# Altium footprint library Footprint_Vlad.PcbLib: 392 footprints (part 22 of 25)
Each footprint in its own frame and in the unit in brackets; x right, y up, seen from the top. Pads: shape width x height; smd on the part's side, far side on the other; paste and mask are expansions set on the pad; w line width, h text height; cw(c..) or ccw(c..) is an arc to the next point about the centre after c.
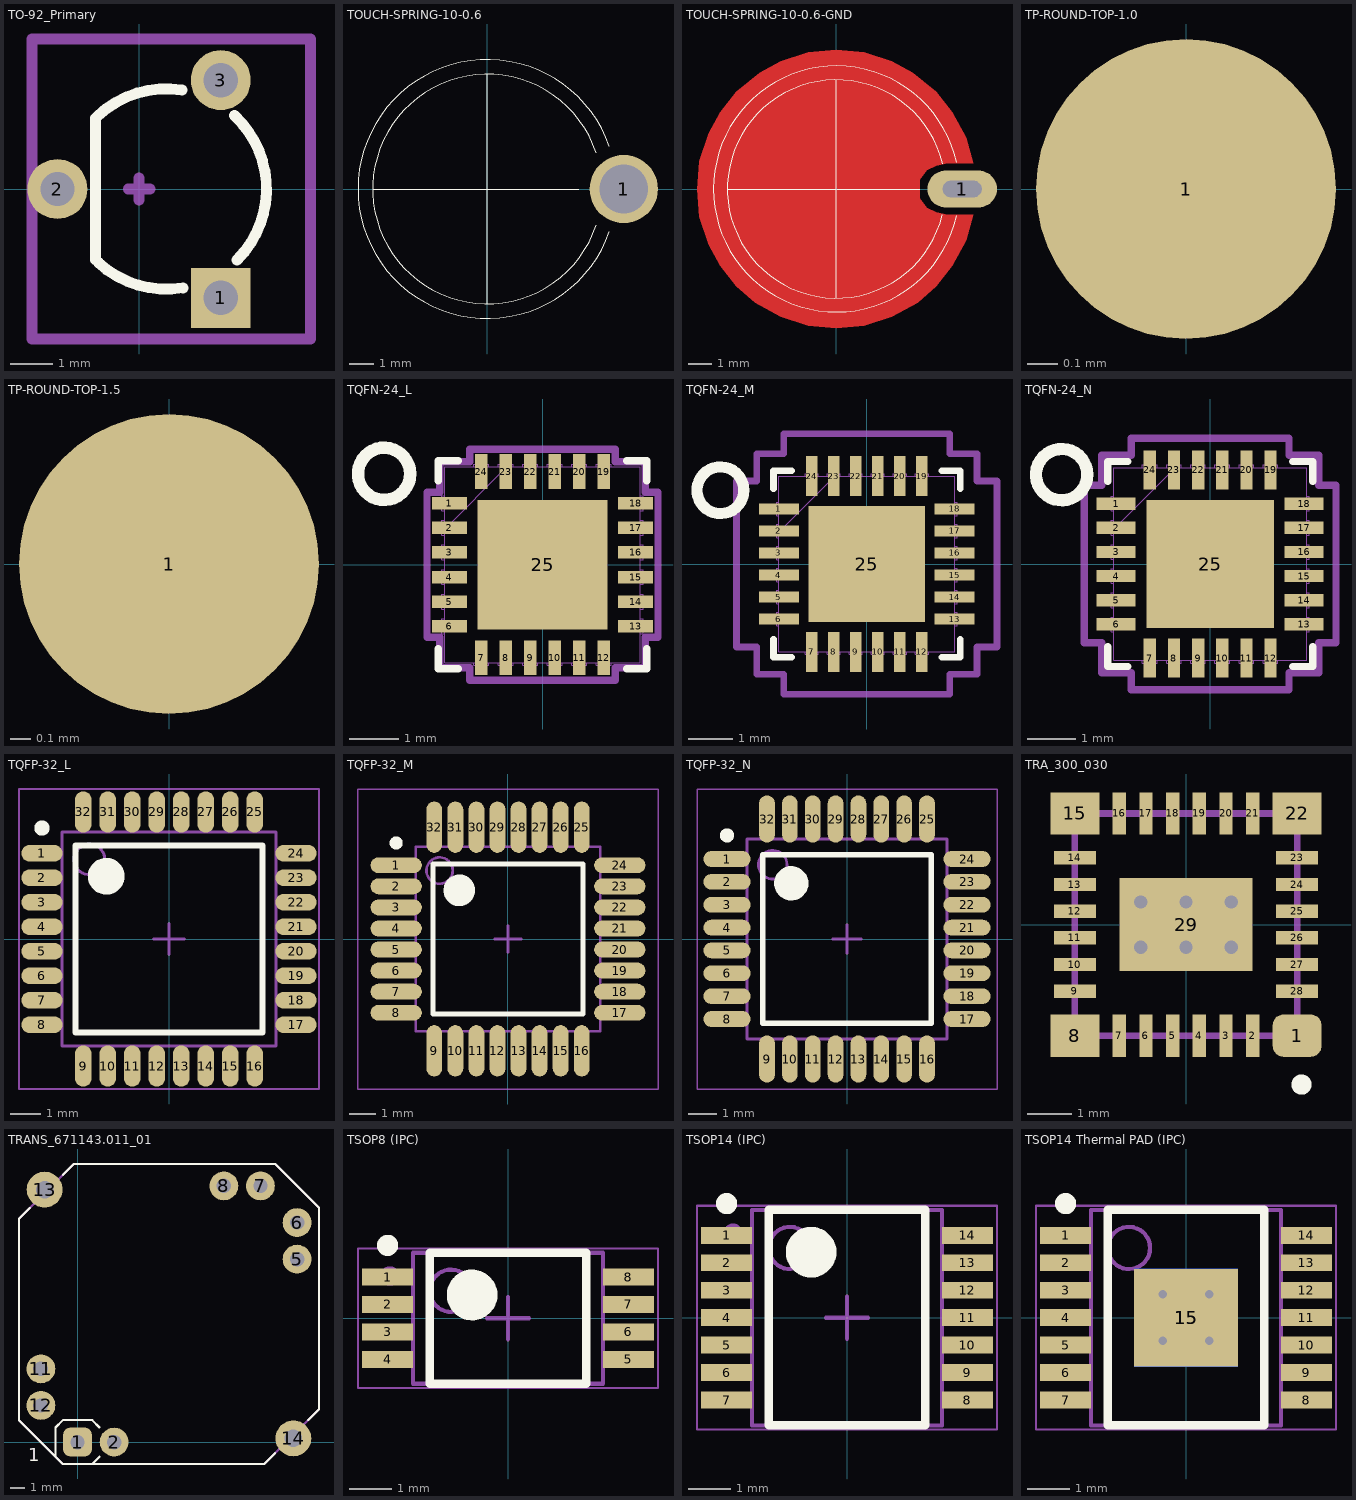
[diagram p21: the footprints below, top view; thin cyan lines are the x and y axes]

## TO-92_Primary [mm]
pads (3):
  rect 1.4x1.4 hole 0.8: 1(1.905,-2.54)
  round 1.4 hole 0.8: 2(-1.905,0) 3(1.905,2.54)
Top Overlay:
  lines w0.254: -1.016,-1.651 -1.016,1.651 ; -0.959,1.71 cw(c0.635,0) 1.001,2.309 ; -0.95,-1.718 ccw(c0.635,0) 1.021,-2.306 ; 2.226,1.712 cw(c0.635,0) 2.288,-1.653
Mechanical 15:
  circle w0.254: c1.9,-2.5 r0.1
  lines w0.254: -0.254,0 0.254,0 ; 0,-0.254 0,0.254 ; -2.5,-3.5 4,-3.5 4,3.5 -2.5,3.5 -2.5,-3.5
  text ".Designator" at -1.3,3.8 h1.52

## TOUCH-SPRING-10-0.6 [mm]
pads (1):
  round 2.8 hole 2: 1(5.6,0)
Top Overlay:
  lines w0.01: 4.588,-0.35 6.238,-0.35 6.238,0.35 4.588,0.35 4.588,-0.35
  lines w0.025: -4.674,0 1.925,0 3.75,0 ; 0,-4.7 0,2.5 0,4.699 ; 4.466,-1.489 cw(c0.008,0.001) 4.466,1.489 ; 5.009,-1.753 cw(c0.008,0.001) 5.01,1.753

## TOUCH-SPRING-10-0.6-GND [mm]
pads (2):
  oval 3x1.6 hole 0.7 slot 1.675 at 0 deg: 1(5.425,0)
  round 0 smd far side paste-25.4 mask-25.4: 2(0,0)
Top Layer:
  region: 0,-6 1.2,-5.9 2.4,-5.5 3.5,-4.9 4.3,-4.2 5,-3.3 5.6,-2.2 5.9,-1.1 4.8,-1.1 4.3,-1 3.9,-0.8 3.6,-0.4 3.6,0 3.6,0.4 3.9,0.8 4.3,1 4.8,1.1 5.9,1.1 5.6,2.2 5,3.3 4.3,4.2 3.3,5 2.4,5.5 1.2,5.9 0,6 -1.2,5.9 -2.4,5.5 -3.3,5 -4.3,4.2 -5,3.3 -5.5,2.4 -5.9,1.2 -6,0 -5.9,-1.2 -5.5,-2.4 -5,-3.3 -4.3,-4.2 -3.5,-4.9 -2.4,-5.5 -1.2,-5.9
Top Overlay:
  lines w0.025: -4.674,0 3.6,0 ; 0,-4.699 0,4.699 ; 4.573,-1.118 cw(c0.008,0.001) 4.579,1.095 ; 5.182,-1.146 cw(c0.008,0.001) 5.183,1.146

## TP-ROUND-TOP-1.0 [mm]
pads (1):
  round 1 smd: 1(0,0)

## TP-ROUND-TOP-1.5 [mm]
pads (1):
  round 1.5 smd: 1(0,0)

## TQFN-24_L [mm]
pads (25):
  rect 0.708x0.255 smd paste+0 mask+0: 1(-1.896,1.25) 2(-1.896,0.75) 3(-1.896,0.25) 4(-1.896,-0.25) 5(-1.896,-0.75) 6(-1.896,-1.25) 13(1.896,-1.25) 14(1.896,-0.75) 15(1.896,-0.25) 16(1.896,0.25) 17(1.896,0.75) 18(1.896,1.25)
  rect 0.255x0.708 smd paste+0 mask+0: 7(-1.25,-1.896) 8(-0.75,-1.896) 9(-0.25,-1.896) 10(0.25,-1.896) 11(0.75,-1.896) 12(1.25,-1.896) 19(1.25,1.896) 20(0.75,1.896) 21(0.25,1.896) 22(-0.25,1.896) 23(-0.75,1.896) 24(-1.25,1.896)
  rect 2.642x2.642 smd paste-1.308 mask+0: 25(0,0)
Top Overlay:
  circle w0.254: c-3.225,1.85 r0.532
  lines w0.152: -2.121,-1.71 -2.121,-2.121 -1.71,-2.121 ; -2.121,1.71 -2.121,2.121 -1.71,2.121 ; 1.71,-2.121 2.121,-2.121 2.121,-1.71 ; 1.71,2.121 2.121,2.121 2.121,1.71
Top Paste:
  region: -0.1,1.221 -1.221,1.221 -1.221,0.1 -0.1,0.1
  region: -0.1,-0.1 -1.221,-0.1 -1.221,-1.221 -0.1,-1.221
  region: 1.221,1.221 0.1,1.221 0.1,0.1 1.221,0.1
  region: 1.221,-0.1 0.1,-0.1 0.1,-1.221 1.221,-1.221
Assembly Top:
  lines w0.025: -1.994,0.724 -0.724,1.994 ; -2.05,-1.402 -2.05,-1.098 -1.994,-1.098 -1.994,-1.402 -2.05,-1.402 ; -2.05,-0.902 -2.05,-0.598 -1.994,-0.598 -1.994,-0.902 -2.05,-0.902 ; -2.05,-0.402 -1.994,-0.402 -1.994,-0.098 -2.05,-0.098 -2.05,-0.402 ; -2.05,0.098 -1.994,0.098 -1.994,0.402 -2.05,0.402 -2.05,0.098 ; -2.05,0.598 -1.994,0.598 -1.994,0.902 -2.05,0.902 -2.05,0.598 ; -2.05,1.098 -1.994,1.098 -1.994,1.402 -2.05,1.402 -2.05,1.098 ; -1.994,-1.994 1.994,-1.994 1.994,1.994 -1.994,1.994 -1.994,-1.994 ; -1.402,-2.05 -1.402,-1.994 -1.098,-1.994 -1.098,-2.05 -1.402,-2.05 ; -1.402,1.994 -1.098,1.994 -1.098,2.05 -1.402,2.05 -1.402,1.994 ; -0.902,-2.05 -0.902,-1.994 -0.598,-1.994 -0.598,-2.05 -0.902,-2.05 ; -0.902,1.994 -0.598,1.994 -0.598,2.05 -0.902,2.05 -0.902,1.994 ; -0.402,-2.05 -0.098,-2.05 -0.098,-1.994 -0.402,-1.994 -0.402,-2.05 ; -0.402,1.994 -0.098,1.994 -0.098,2.05 -0.402,2.05 -0.402,1.994 ; 0.098,-2.05 0.402,-2.05 0.402,-1.994 0.098,-1.994 0.098,-2.05 ; 0.098,1.994 0.402,1.994 0.402,2.05 0.098,2.05 0.098,1.994 ; 0.598,-2.05 0.902,-2.05 0.902,-1.994 0.598,-1.994 0.598,-2.05 ; 0.598,1.994 0.902,1.994 0.902,2.05 0.598,2.05 0.598,1.994 ; 1.098,-2.05 1.402,-2.05 1.402,-1.994 1.098,-1.994 1.098,-2.05 ; 1.098,1.994 1.402,1.994 1.402,2.05 1.098,2.05 1.098,1.994 ; 1.994,-1.402 2.05,-1.402 2.05,-1.098 1.994,-1.098 1.994,-1.402 ; 1.994,-0.902 2.05,-0.902 2.05,-0.598 1.994,-0.598 1.994,-0.902 ; 1.994,-0.402 2.05,-0.402 2.05,-0.098 1.994,-0.098 1.994,-0.402 ; 1.994,0.098 2.05,0.098 2.05,0.402 1.994,0.402 1.994,0.098 ; 1.994,0.598 2.05,0.598 2.05,0.902 1.994,0.902 1.994,0.598 ; 1.994,1.098 2.05,1.098 2.05,1.402 1.994,1.402 1.994,1.098
  text "*" at -1.859,0.865 h1.27
Courtyard Top:
  lines w0.152: -2.352,-1.479 -2.095,-1.479 -2.095,-2.095 -1.479,-2.095 -1.479,-2.352 1.479,-2.352 1.479,-2.095 2.095,-2.095 2.095,-1.479 2.352,-1.479 2.352,1.479 2.095,1.479 2.095,2.095 1.479,2.095 1.479,2.352 -1.479,2.352 -1.479,2.095 -2.095,2.095 -2.095,1.479 -2.352,1.479 -2.352,-1.479
3D body "21-0139_T2444+4_MXM.step": height 0.81, standoff 0, extent -2.05,-2.05 2.05,2.05

## TQFN-24_M [mm]
pads (25):
  rect 0.908x0.255 smd paste+0 mask+0: 1(-1.996,1.25) 2(-1.996,0.75) 3(-1.996,0.25) 4(-1.996,-0.25) 5(-1.996,-0.75) 6(-1.996,-1.25) 13(1.996,-1.25) 14(1.996,-0.75) 15(1.996,-0.25) 16(1.996,0.25) 17(1.996,0.75) 18(1.996,1.25)
  rect 0.255x0.908 smd paste+0 mask+0: 7(-1.25,-1.996) 8(-0.75,-1.996) 9(-0.25,-1.996) 10(0.25,-1.996) 11(0.75,-1.996) 12(1.25,-1.996) 19(1.25,1.996) 20(0.75,1.996) 21(0.25,1.996) 22(-0.25,1.996) 23(-0.75,1.996) 24(-1.25,1.996)
  rect 2.642x2.642 smd paste-1.308 mask+0: 25(0,0)
Top Overlay:
  circle w0.254: c-3.325,1.675 r0.532
  lines w0.152: -2.121,-1.71 -2.121,-2.121 -1.71,-2.121 ; -2.121,1.71 -2.121,2.121 -1.71,2.121 ; 1.71,-2.121 2.121,-2.121 2.121,-1.71 ; 1.71,2.121 2.121,2.121 2.121,1.71
Top Paste:
  region: 1.221,-0.1 0.1,-0.1 0.1,-1.221 1.221,-1.221
  region: 1.221,1.221 0.1,1.221 0.1,0.1 1.221,0.1
  region: -0.1,-0.1 -1.221,-0.1 -1.221,-1.221 -0.1,-1.221
  region: -0.1,1.221 -1.221,1.221 -1.221,0.1 -0.1,0.1
Assembly Top:
  lines w0.025: -1.994,0.724 -0.724,1.994 ; -2.05,-1.402 -1.994,-1.402 -1.994,-1.098 -2.05,-1.098 -2.05,-1.402 ; -2.05,-0.902 -2.05,-0.598 -1.994,-0.598 -1.994,-0.902 -2.05,-0.902 ; -2.05,-0.402 -1.994,-0.402 -1.994,-0.098 -2.05,-0.098 -2.05,-0.402 ; -2.05,0.098 -1.994,0.098 -1.994,0.402 -2.05,0.402 -2.05,0.098 ; -2.05,0.598 -1.994,0.598 -1.994,0.902 -2.05,0.902 -2.05,0.598 ; -2.05,1.098 -1.994,1.098 -1.994,1.402 -2.05,1.402 -2.05,1.098 ; -1.994,-1.994 1.994,-1.994 1.994,1.994 -1.994,1.994 -1.994,-1.994 ; -1.402,-2.05 -1.402,-1.994 -1.098,-1.994 -1.098,-2.05 -1.402,-2.05 ; -1.402,1.994 -1.098,1.994 -1.098,2.05 -1.402,2.05 -1.402,1.994 ; -0.902,-2.05 -0.902,-1.994 -0.598,-1.994 -0.598,-2.05 -0.902,-2.05 ; -0.902,1.994 -0.598,1.994 -0.598,2.05 -0.902,2.05 -0.902,1.994 ; -0.402,-2.05 -0.098,-2.05 -0.098,-1.994 -0.402,-1.994 -0.402,-2.05 ; -0.402,1.994 -0.098,1.994 -0.098,2.05 -0.402,2.05 -0.402,1.994 ; 0.098,-2.05 0.402,-2.05 0.402,-1.994 0.098,-1.994 0.098,-2.05 ; 0.098,1.994 0.402,1.994 0.402,2.05 0.098,2.05 0.098,1.994 ; 0.598,-2.05 0.902,-2.05 0.902,-1.994 0.598,-1.994 0.598,-2.05 ; 0.598,1.994 0.902,1.994 0.902,2.05 0.598,2.05 0.598,1.994 ; 1.098,-2.05 1.402,-2.05 1.402,-1.994 1.098,-1.994 1.098,-2.05 ; 1.098,1.994 1.402,1.994 1.402,2.05 1.098,2.05 1.098,1.994 ; 1.994,-1.402 2.05,-1.402 2.05,-1.098 1.994,-1.098 1.994,-1.402 ; 1.994,-0.902 2.05,-0.902 2.05,-0.598 1.994,-0.598 1.994,-0.902 ; 1.994,-0.402 2.05,-0.402 2.05,-0.098 1.994,-0.098 1.994,-0.402 ; 1.994,0.098 2.05,0.098 2.05,0.402 1.994,0.402 1.994,0.098 ; 1.994,0.598 2.05,0.598 2.05,0.902 1.994,0.902 1.994,0.598 ; 1.994,1.098 2.05,1.098 2.05,1.402 1.994,1.402 1.994,1.098
  text "*" at -1.859,0.865 h1.27
Courtyard Top:
  lines w0.152: -2.958,-1.885 -2.502,-1.885 -2.502,-2.502 -1.885,-2.502 -1.885,-2.958 1.885,-2.958 1.885,-2.502 2.502,-2.502 2.502,-1.885 2.958,-1.885 2.958,1.885 2.502,1.885 2.502,2.502 1.885,2.502 1.885,2.958 -1.885,2.958 -1.885,2.502 -2.502,2.502 -2.502,1.885 -2.958,1.885 -2.958,-1.885
3D body "21-0139_T2444+4_MXM.step": height 0.81, standoff 0, extent -2.05,-2.05 2.05,2.05

## TQFN-24_N [mm]
pads (25):
  rect 0.808x0.255 smd paste+0 mask+0: 1(-1.946,1.25) 2(-1.946,0.75) 3(-1.946,0.25) 4(-1.946,-0.25) 5(-1.946,-0.75) 6(-1.946,-1.25) 13(1.946,-1.25) 14(1.946,-0.75) 15(1.946,-0.25) 16(1.946,0.25) 17(1.946,0.75) 18(1.946,1.25)
  rect 0.255x0.808 smd paste+0 mask+0: 7(-1.25,-1.946) 8(-0.75,-1.946) 9(-0.25,-1.946) 10(0.25,-1.946) 11(0.75,-1.946) 12(1.25,-1.946) 19(1.25,1.946) 20(0.75,1.946) 21(0.25,1.946) 22(-0.25,1.946) 23(-0.75,1.946) 24(-1.25,1.946)
  rect 2.642x2.642 smd paste-1.308 mask+0: 25(0,0)
Top Overlay:
  circle w0.254: c-3.075,1.85 r0.532
  lines w0.152: -2.121,-1.71 -2.121,-2.121 -1.71,-2.121 ; -2.121,1.71 -2.121,2.121 -1.71,2.121 ; 1.71,-2.121 2.121,-2.121 2.121,-1.71 ; 1.71,2.121 2.121,2.121 2.121,1.71
Top Paste:
  region: 1.221,-0.1 0.1,-0.1 0.1,-1.221 1.221,-1.221
  region: 1.221,1.221 0.1,1.221 0.1,0.1 1.221,0.1
  region: -0.1,-0.1 -1.221,-0.1 -1.221,-1.221 -0.1,-1.221
  region: -0.1,1.221 -1.221,1.221 -1.221,0.1 -0.1,0.1
Assembly Top:
  lines w0.025: -1.994,0.724 -0.724,1.994 ; -2.05,-1.402 -1.994,-1.402 -1.994,-1.098 -2.05,-1.098 -2.05,-1.402 ; -2.05,-0.902 -2.05,-0.598 -1.994,-0.598 -1.994,-0.902 -2.05,-0.902 ; -2.05,-0.402 -1.994,-0.402 -1.994,-0.098 -2.05,-0.098 -2.05,-0.402 ; -2.05,0.098 -1.994,0.098 -1.994,0.402 -2.05,0.402 -2.05,0.098 ; -2.05,0.598 -1.994,0.598 -1.994,0.902 -2.05,0.902 -2.05,0.598 ; -2.05,1.098 -1.994,1.098 -1.994,1.402 -2.05,1.402 -2.05,1.098 ; -1.994,-1.994 1.994,-1.994 1.994,1.994 -1.994,1.994 -1.994,-1.994 ; -1.402,-2.05 -1.402,-1.994 -1.098,-1.994 -1.098,-2.05 -1.402,-2.05 ; -1.402,1.994 -1.098,1.994 -1.098,2.05 -1.402,2.05 -1.402,1.994 ; -0.902,-2.05 -0.902,-1.994 -0.598,-1.994 -0.598,-2.05 -0.902,-2.05 ; -0.902,1.994 -0.598,1.994 -0.598,2.05 -0.902,2.05 -0.902,1.994 ; -0.402,-2.05 -0.098,-2.05 -0.098,-1.994 -0.402,-1.994 -0.402,-2.05 ; -0.402,1.994 -0.098,1.994 -0.098,2.05 -0.402,2.05 -0.402,1.994 ; 0.098,-2.05 0.402,-2.05 0.402,-1.994 0.098,-1.994 0.098,-2.05 ; 0.098,1.994 0.402,1.994 0.402,2.05 0.098,2.05 0.098,1.994 ; 0.598,-2.05 0.902,-2.05 0.902,-1.994 0.598,-1.994 0.598,-2.05 ; 0.598,1.994 0.902,1.994 0.902,2.05 0.598,2.05 0.598,1.994 ; 1.098,-2.05 1.402,-2.05 1.402,-1.994 1.098,-1.994 1.098,-2.05 ; 1.098,1.994 1.402,1.994 1.402,2.05 1.098,2.05 1.098,1.994 ; 1.994,-1.402 2.05,-1.402 2.05,-1.098 1.994,-1.098 1.994,-1.402 ; 1.994,-0.902 2.05,-0.902 2.05,-0.598 1.994,-0.598 1.994,-0.902 ; 1.994,-0.402 2.05,-0.402 2.05,-0.098 1.994,-0.098 1.994,-0.402 ; 1.994,0.098 2.05,0.098 2.05,0.402 1.994,0.402 1.994,0.098 ; 1.994,0.598 2.05,0.598 2.05,0.902 1.994,0.902 1.994,0.598 ; 1.994,1.098 2.05,1.098 2.05,1.402 1.994,1.402 1.994,1.098
  text "*" at -1.859,0.865 h1.27
Courtyard Top:
  lines w0.152: -2.604,-1.631 -2.248,-1.631 -2.248,-2.248 -1.631,-2.248 -1.631,-2.604 1.631,-2.604 1.631,-2.248 2.248,-2.248 2.248,-1.631 2.604,-1.631 2.604,1.631 2.248,1.631 2.248,2.248 1.631,2.248 1.631,2.604 -1.631,2.604 -1.631,2.248 -2.248,2.248 -2.248,1.631 -2.604,1.631 -2.604,-1.631
3D body "21-0139_T2444+4_MXM.step": height 0.81, standoff 0, extent -2.05,-2.05 2.05,2.05

## TQFP-32_L [mm] "Thin QFP, 32-Leads, Body 7x7mm, Pitch 0.8mm, IPC High Density"
height 1.2
pads (32):
  oval 1.35x0.55 smd: 1(-4.15,2.8) 2(-4.15,2) 3(-4.15,1.2) 4(-4.15,0.4) 5(-4.15,-0.4) 6(-4.15,-1.2) 7(-4.15,-2) 8(-4.15,-2.8) 17(4.15,-2.8) 18(4.15,-2) 19(4.15,-1.2) 20(4.15,-0.4) 21(4.15,0.4) 22(4.15,1.2) 23(4.15,2) 24(4.15,2.8)
  oval 0.55x1.35 smd: 9(-2.8,-4.15) 10(-2,-4.15) 11(-1.2,-4.15) 12(-0.4,-4.15) 13(0.4,-4.15) 14(1.2,-4.15) 15(2,-4.15) 16(2.8,-4.15) 25(2.8,4.15) 26(2,4.15) 27(1.2,4.15) 28(0.4,4.15) 29(-0.4,4.15) 30(-1.2,4.15) 31(-2,4.15) 32(-2.8,4.15)
Top Overlay:
  circle w0.6: c-2.05,2.05 r0.3
  circle w0.25: c-4.15,3.625 r0.125
  lines w0.2: -3.05,-3.05 -3.05,3.05 3.05,3.05 3.05,-3.05 -3.05,-3.05
Mechanical 13:
  circle w0.1: c-2.6,2.6 r0.5
  lines w0.1: -3.5,-3.5 3.5,-3.5 3.5,3.5 -3.5,3.5 -3.5,-3.5
Mechanical 15:
  lines w0.05: -4.9,-4.9 4.9,-4.9 4.9,4.9 -4.9,4.9 -4.9,-4.9
  lines w0.1: -0.5,0 0.5,0 ; 0,-0.5 0,0.5
3D body "TQFP32_CMA_MCH.step": height 1.2, standoff 0, extent -4.496,-4.496 4.496,4.496

## TQFP-32_M [mm] "Thin QFP, 32-Leads, Body 7x7mm, Pitch 0.8mm, IPC Low Density"
height 1.2
pads (32):
  oval 1.95x0.6 smd: 1(-4.25,2.8) 2(-4.25,2) 3(-4.25,1.2) 4(-4.25,0.4) 5(-4.25,-0.4) 6(-4.25,-1.2) 7(-4.25,-2) 8(-4.25,-2.8) 17(4.25,-2.8) 18(4.25,-2) 19(4.25,-1.2) 20(4.25,-0.4) 21(4.25,0.4) 22(4.25,1.2) 23(4.25,2) 24(4.25,2.8)
  oval 0.6x1.95 smd: 9(-2.8,-4.25) 10(-2,-4.25) 11(-1.2,-4.25) 12(-0.4,-4.25) 13(0.4,-4.25) 14(1.2,-4.25) 15(2,-4.25) 16(2.8,-4.25) 25(2.8,4.25) 26(2,4.25) 27(1.2,4.25) 28(0.4,4.25) 29(-0.4,4.25) 30(-1.2,4.25) 31(-2,4.25) 32(-2.8,4.25)
Top Overlay:
  circle w0.6: c-1.85,1.85 r0.3
  circle w0.25: c-4.25,3.65 r0.125
  lines w0.2: -2.85,-2.85 2.85,-2.85 2.85,2.85 -2.85,2.85 -2.85,-2.85
Mechanical 13:
  circle w0.1: c-2.6,2.6 r0.5
  lines w0.1: -3.5,-3.5 3.5,-3.5 3.5,3.5 -3.5,3.5 -3.5,-3.5
Mechanical 15:
  lines w0.05: -5.7,-5.7 5.7,-5.7 5.7,5.7 -5.7,5.7 -5.7,-5.7
  lines w0.1: -0.5,0 0.5,0 ; 0,-0.5 0,0.5
3D body "TQFP32_CMA_MCH.step": height 1.2, standoff 0, extent -4.496,-4.496 4.496,4.496

## TQFP-32_N [mm] "Thin QFP, 32-Leads, Body 7x7mm, Pitch 0.8mm, IPC Medium Density"
height 1.2
pads (32):
  oval 1.65x0.55 smd: 1(-4.2,2.8) 2(-4.2,2) 3(-4.2,1.2) 4(-4.2,0.4) 5(-4.2,-0.4) 6(-4.2,-1.2) 7(-4.2,-2) 8(-4.2,-2.8) 17(4.2,-2.8) 18(4.2,-2) 19(4.2,-1.2) 20(4.2,-0.4) 21(4.2,0.4) 22(4.2,1.2) 23(4.2,2) 24(4.2,2.8)
  oval 0.55x1.65 smd: 9(-2.8,-4.2) 10(-2,-4.2) 11(-1.2,-4.2) 12(-0.4,-4.2) 13(0.4,-4.2) 14(1.2,-4.2) 15(2,-4.2) 16(2.8,-4.2) 25(2.8,4.2) 26(2,4.2) 27(1.2,4.2) 28(0.4,4.2) 29(-0.4,4.2) 30(-1.2,4.2) 31(-2,4.2) 32(-2.8,4.2)
Top Overlay:
  circle w0.6: c-1.95,1.95 r0.3
  circle w0.25: c-4.2,3.625 r0.125
  lines w0.2: -2.95,-2.95 2.95,-2.95 2.95,2.95 -2.95,2.95 -2.95,-2.95
Mechanical 13:
  circle w0.1: c-2.6,2.6 r0.5
  lines w0.1: -3.5,-3.5 3.5,-3.5 3.5,3.5 -3.5,3.5 -3.5,-3.5
Mechanical 15:
  lines w0.05: -5.25,-5.25 5.25,-5.25 5.25,5.25 -5.25,5.25 -5.25,-5.25
  lines w0.1: -0.5,0 0.5,0 ; 0,-0.5 0,0.5
3D body "TQFP32_CMA_MCH.step": height 1.2, standoff 0, extent -4.496,-4.496 4.496,4.496

## TRA_300_030 [mm]
pads (29):
  rrect50% 1.1x0.95 smd: 1(2.5,-2.5)
  rect 0.3x0.95 smd: 2(1.5,-2.5) 3(0.9,-2.5) 4(0.3,-2.5) 5(-0.3,-2.5) 6(-0.9,-2.5) 7(-1.5,-2.5) 16(-1.5,2.5) 17(-0.9,2.5) 18(-0.3,2.5) 19(0.3,2.5) 20(0.9,2.5) 21(1.5,2.5)
  rect 1.1x0.95 smd: 8(-2.5,-2.5) 15(-2.5,2.5) 22(2.5,2.5)
  rect 0.95x0.3 smd: 9(-2.5,-1.5) 10(-2.5,-0.9) 11(-2.5,-0.3) 12(-2.5,0.3) 13(-2.5,0.9) 14(-2.5,1.5) 23(2.5,1.5) 24(2.5,0.9) 25(2.5,0.3) 26(2.5,-0.3) 27(2.5,-0.9) 28(2.5,-1.5)
  rect 3x2.1 smd: 29(0,0)
via -1.016,-0.508 diameter 0.6 hole 0.3
via 0,-0.508 diameter 0.6 hole 0.3
via 1.016,-0.508 diameter 0.6 hole 0.3
via 1.016,0.508 diameter 0.6 hole 0.3
via 0,0.508 diameter 0.6 hole 0.3
via -1.016,0.508 diameter 0.6 hole 0.3
Top Overlay:
  circle w0.254: c2.6,-3.6 r0.1
Mechanical 1:
  lines w0.15: -2.5,-2.5 2.5,-2.5 2.5,2.5 -2.5,2.5 -2.5,-2.5
3D body: height 1, standoff 0, extent -2.5,-2.5 2.5,2.5

## TRANS_671143.011_01 [mm]
pads (10):
  rrect50% 2x2 hole 1: 1(0,0)
  round 2 hole 1: 2(2.54,0) 5(15.24,12.7) 6(15.24,15.24) 7(12.7,17.78) 8(10.16,17.78) 11(-2.54,5.08) 12(-2.54,2.54)
  round 2.5 hole 1.2: 13(-2.286,17.526) 14(14.986,0.254)
Top Overlay:
  lines w0.15: -3.302,16.256 -4.064,15.494 -4.064,1.524 -1.016,-1.524 12.954,-1.524 13.716,-0.762 ; -1.524,-1.016 -1.524,1.016 -1.016,1.524 1.016,1.524 1.524,1.016 ; -1.016,18.542 -0.254,19.304 13.716,19.304 16.764,16.256 16.764,2.286 16.002,1.524 ; 1.016,-1.524 1.524,-1.016
  text "1" at -3.429,-1.35 h0.9
Mechanical 1:
  lines w0.15: -0.26,19.3 -4.064,15.494 -4.064,1.524 -1.016,-1.524 12.954,-1.524 16.76,2.28 ; -0.254,19.304 13.716,19.304 16.764,16.256 16.764,2.286
  text "1" at -0.56,-0.79 h0.95
3D body: height 16.3, standoff 0, extent -4.064,-1.524 16.764,19.304
3D body: height 16.4, standoff 0, extent -0.744,-0.748 0.75,0.749

## TSOP8 (IPC) [mm] "TSOP, 8-Leads, Body 3.00x4.40mm, Pitch 0.65mm, IPC High Density"
height 1.2
pads (8):
  rect 1.2x0.4 smd: 1(-2.85,0.975) 2(-2.85,0.325) 3(-2.85,-0.325) 4(-2.85,-0.975) 5(2.85,-0.975) 6(2.85,-0.325) 7(2.85,0.325) 8(2.85,0.975)
Top Overlay:
  circle w0.25: c-2.85,1.725 r0.125
  circle w0.6: c-0.85,0.55 r0.3
  lines w0.2: -1.85,-1.55 -1.85,1.55 1.85,1.55 1.85,-1.55 -1.85,-1.55
Mechanical 13:
  circle w0.1: c-1.35,0.65 r0.5
  lines w0.1: -2.25,-1.55 -2.25,1.55 2.25,1.55 2.25,-1.55 -2.25,-1.55
Mechanical 15:
  circle w0.254: c-2.8,1 r0.1
  lines w0.05: -3.55,-1.65 -3.55,1.65 3.55,1.65 3.55,-1.65 -3.55,-1.65
  lines w0.1: -0.5,0 0.5,0 ; 0,-0.5 0,0.5
  text ".Designator" at -2.5,2 h1.52
3D body "TSOP65P640X120-8L.step": height 1.2, standoff 0, extent -3.2,-1.55 3.2,1.55

## TSOP14 (IPC) [mm] "TSOP, 14-Leads, Body 5.00x4.40mm, Pitch 0.65mm, IPC High Density"
height 1.2
pads (14):
  rect 1.2x0.4 smd: 1(-2.85,1.95) 2(-2.85,1.3) 3(-2.85,0.65) 4(-2.85,0) 5(-2.85,-0.65) 6(-2.85,-1.3) 7(-2.85,-1.95) 8(2.85,-1.95) 9(2.85,-1.3) 10(2.85,-0.65) 11(2.85,0) 12(2.85,0.65) 13(2.85,1.3) 14(2.85,1.95)
Top Overlay:
  circle w0.6: c-0.85,1.55 r0.3
  circle w0.25: c-2.85,2.7 r0.125
  lines w0.2: -1.85,-2.55 1.85,-2.55 1.85,2.55 -1.85,2.55 -1.85,-2.55
Mechanical 13:
  circle w0.1: c-1.35,1.65 r0.5
  lines w0.1: -2.25,-2.55 2.25,-2.55 2.25,2.55 -2.25,2.55 -2.25,-2.55
Mechanical 15:
  circle w0.254: c-2.7,2 r0.1
  lines w0.05: -3.55,-2.65 3.55,-2.65 3.55,2.65 -3.55,2.65 -3.55,-2.65
  lines w0.1: -0.5,0 0.5,0 ; 0,-0.5 0,0.5
  text ".Designator" at -2.5,3 h1.52
3D body "TSOP65P640X120-14L.step": height 1.2, standoff 0, extent -3.2,-2.55 3.2,2.55

## TSOP14 Thermal PAD (IPC) [mm] "TSOP, 14-Leads, Body 4.85x4.40mm, Pitch 0.65mm, Thermal Pad 2.31x2.46mm, IPC High Density"
height 1.2
pads (16):
  rect 1.2x0.4 smd: 1(-2.85,1.95) 2(-2.85,1.3) 3(-2.85,0.65) 4(-2.85,0) 5(-2.85,-0.65) 6(-2.85,-1.3) 7(-2.85,-1.95) 8(2.85,-1.95) 9(2.85,-1.3) 10(2.85,-0.65) 11(2.85,0) 12(2.85,0.65) 13(2.85,1.3) 14(2.85,1.95)
  rect 2.46x2.31 smd: 15(0,0)
  rect 2.46x2.31 smd far side: 15(0,0)
via -0.55,0.55 diameter 0.5 hole 0.2
via 0.55,0.55 diameter 0.5 hole 0.2
via -0.55,-0.55 diameter 0.5 hole 0.2
via 0.55,-0.55 diameter 0.5 hole 0.2
Top Overlay:
  circle w0.25: c-2.85,2.7 r0.125
  lines w0.2: -1.85,-2.55 -1.85,2.55 1.85,2.55 1.85,-2.55 -1.85,-2.55
Mechanical 15:
  circle w0.1: c-1.35,1.65 r0.5
  lines w0.05: -3.55,-2.65 -3.55,2.65 3.55,2.65 3.55,-2.65 -3.55,-2.65
  lines w0.1: -0.5,0 0.5,0 ; 0,-0.5 0,0.5 ; -2.25,-2.55 -2.25,2.55 2.25,2.55 2.25,-2.55 -2.25,-2.55
  text ".Designator" at -2.5,3 h1.52
3D body "TSOP65P640X120_HS-15L.step": height 1.2, standoff 0, extent -3.2,-2.55 3.2,2.55